# Altium footprint library PcbLib1.PcbLib: 24 footprints (part 1 of 2)
Each footprint in its own frame and in the unit in brackets; x right, y up, seen from the top. Pads: shape width x height; smd on the part's side, far side on the other; paste and mask are expansions set on the pad; w line width, h text height; cw(c..) or ccw(c..) is an arc to the next point about the centre after c.
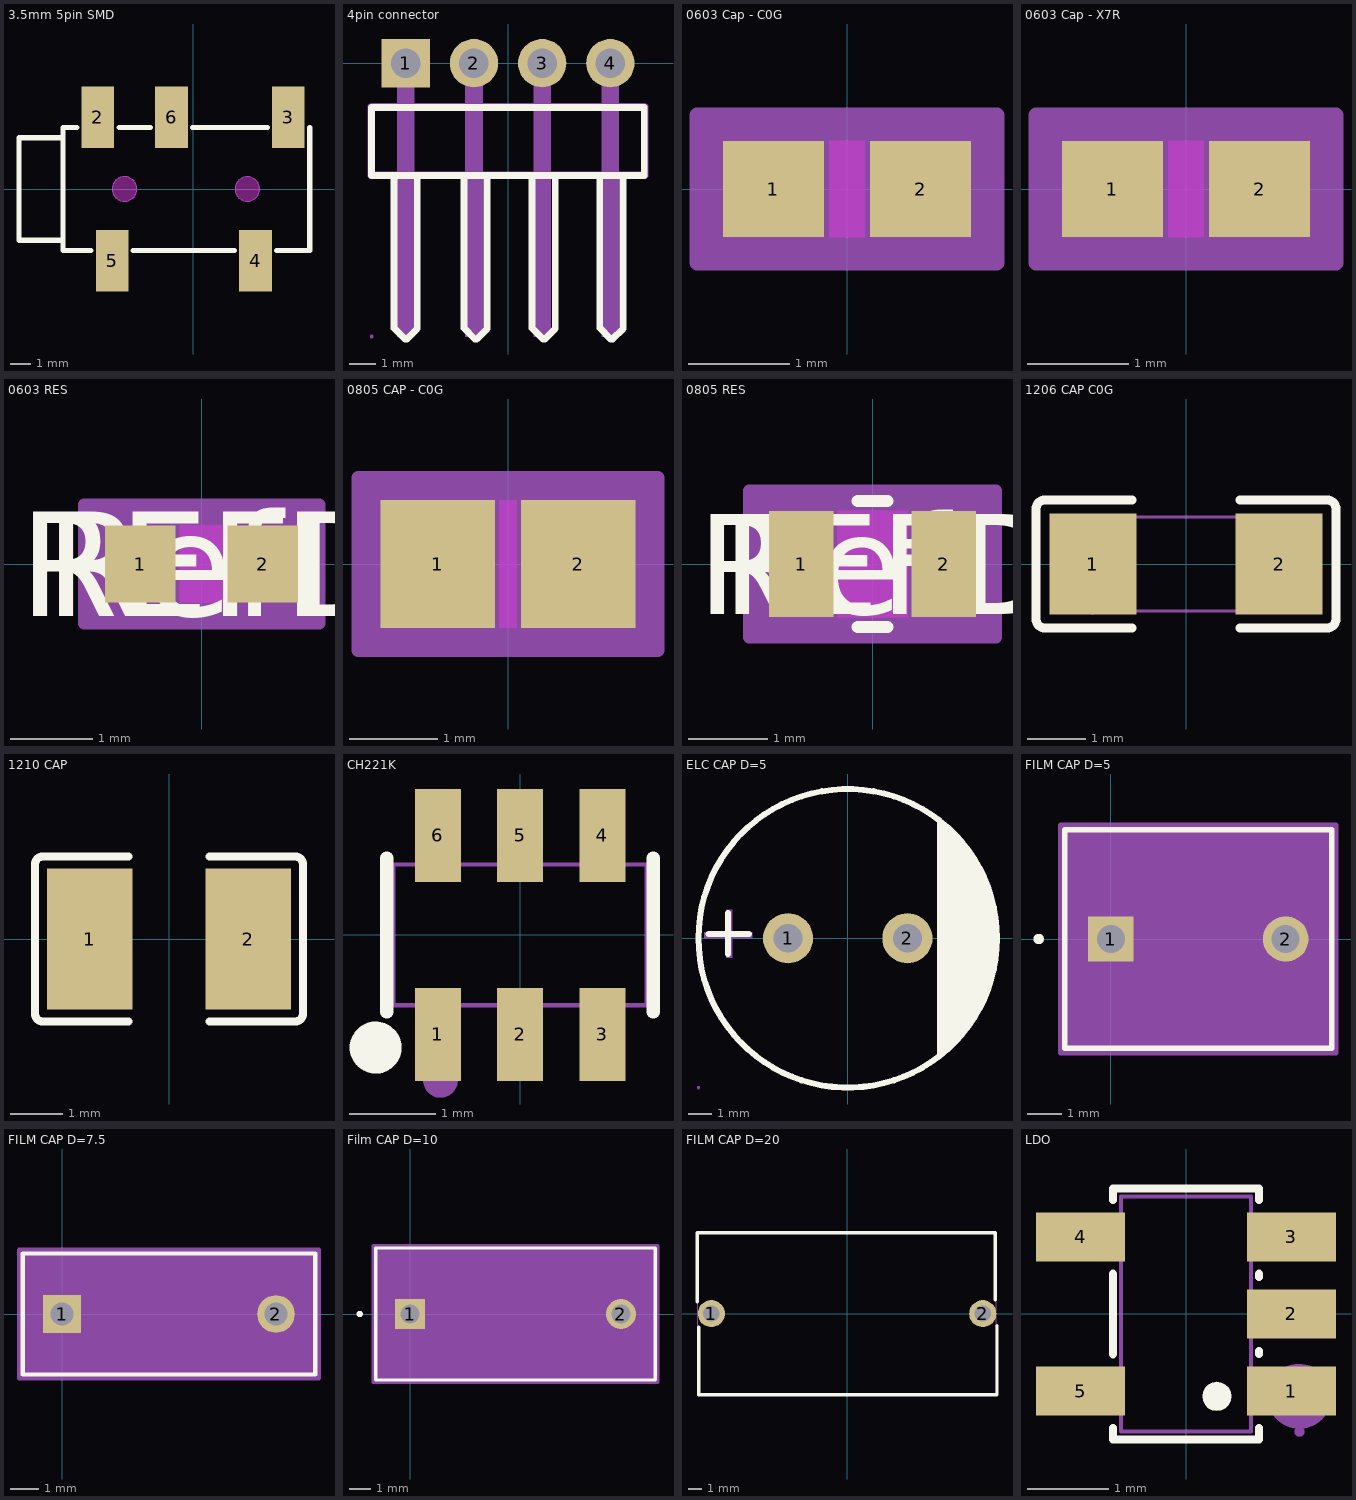
[diagram p0: the footprints below, top view; thin cyan lines are the x and y axes]

## 3.5mm 5pin SMD [mm]
pads (5):
  rect 1.6x3 smd: 2(-4.65,3.5) 3(4.65,3.5) 4(3.05,-3.5) 5(-3.95,-3.5) 6(-1.05,3.5)
Top Overlay:
  lines w0.254: -6.35,-2.5 -8.5,-2.5 -8.5,2.5 -6.35,2.5 ; -5.681,3 -6.35,3 -6.35,-3 -4.981,-3 ; -3.619,3 -2.081,3 ; -2.919,-3 2.019,-3 ; -0.019,3 3.619,3 ; 4.081,-3 5.7,-3 5.7,3 5.681,3
Keep-Out Layer:
  board cut-out: -2.75,0 -2.75,-0.119 -2.841,-0.34 -3.01,-0.509 -3.231,-0.6 -3.469,-0.6 -3.69,-0.509 -3.859,-0.34 -3.95,-0.119 -3.95,0 -3.95,0.119 -3.859,0.34 -3.69,0.509 -3.469,0.6 -3.231,0.6 -3.01,0.509 -2.841,0.34 -2.75,0.119
  board cut-out: 3.25,0 3.25,-0.119 3.159,-0.34 2.99,-0.509 2.769,-0.6 2.531,-0.6 2.31,-0.509 2.141,-0.34 2.05,-0.119 2.05,0 2.05,0.119 2.141,0.34 2.31,0.509 2.531,0.6 2.769,0.6 2.99,0.509 3.159,0.34 3.25,0.119
Keep-Out Layer:
  circle w0.003: c-3.35,0 r0.6
  circle w0.003: c2.65,0 r0.6
  region: -2.75,0 -2.75,-0.119 -2.841,-0.34 -3.01,-0.509 -3.231,-0.6 -3.469,-0.6 -3.69,-0.509 -3.859,-0.34 -3.95,-0.119 -3.95,0 -3.95,0.119 -3.859,0.34 -3.69,0.509 -3.469,0.6 -3.231,0.6 -3.01,0.509 -2.841,0.34 -2.75,0.119
  region: -2.75,0 -2.759,-0.104 -2.786,-0.205 -2.83,-0.3 -2.89,-0.386 -2.964,-0.46 -3.05,-0.52 -3.145,-0.564 -3.246,-0.591 -3.35,-0.6 -3.454,-0.591 -3.555,-0.564 -3.65,-0.52 -3.736,-0.46 -3.81,-0.386 -3.87,-0.3 -3.914,-0.205 -3.941,-0.104 -3.95,0 -3.941,0.104 -3.914,0.205 -3.87,0.3 -3.81,0.386 -3.736,0.46 -3.65,0.52 -3.555,0.564 -3.454,0.591 -3.35,0.6 -3.246,0.591 -3.145,0.564 -3.05,0.52 -2.964,0.46 -2.89,0.386 -2.83,0.3 -2.786,0.205 -2.759,0.104
  region: 3.25,0 3.25,-0.119 3.159,-0.34 2.99,-0.509 2.769,-0.6 2.531,-0.6 2.31,-0.509 2.141,-0.34 2.05,-0.119 2.05,0 2.05,0.119 2.141,0.34 2.31,0.509 2.531,0.6 2.769,0.6 2.99,0.509 3.159,0.34 3.25,0.119
  region: 3.25,0 3.241,-0.104 3.214,-0.205 3.17,-0.3 3.11,-0.386 3.036,-0.46 2.95,-0.52 2.855,-0.564 2.754,-0.591 2.65,-0.6 2.546,-0.591 2.445,-0.564 2.35,-0.52 2.264,-0.46 2.19,-0.386 2.13,-0.3 2.086,-0.205 2.059,-0.104 2.05,0 2.059,0.104 2.086,0.205 2.13,0.3 2.19,0.386 2.264,0.46 2.35,0.52 2.445,0.564 2.546,0.591 2.65,0.6 2.754,0.591 2.855,0.564 2.95,0.52 3.036,0.46 3.11,0.386 3.17,0.3 3.214,0.205 3.241,0.104
Mechanical 1:
  circle w0.003: c-3.35,0 r0.6
  circle w0.003: c2.65,0 r0.6

## 4pin connector [mm]
pads (4):
  rect 1.8x1.8 hole 1.1: 1(-3.81,0)
  round 1.8 hole 1.1: 2(-1.27,0) 3(1.27,0) 4(3.81,0)
Top Overlay:
  lines w0.254: -5.09,-1.699 -5.09,-4.181 5.07,-4.181 5.07,-1.651 -5.09,-1.651 ; -3.84,-10.273 -4.244,-9.869 ; -3.764,-10.273 -3.383,-9.892 ; -1.644,-4.273 -1.644,-9.869 -1.24,-10.273 ; -1.164,-10.273 -0.783,-9.892 -0.783,-4.273 ; 1.299,-10.273 0.895,-9.869 ; 1.375,-10.273 1.756,-9.892 ; 3.417,-4.273 3.417,-9.869 3.821,-10.273 ; 3.897,-10.273 4.278,-9.892 4.278,-4.273 ; -4.244,-9.869 -4.244,-4.273 -4.244,-9.869 ; -3.383,-9.892 -3.383,-4.273 -3.383,-9.892 ; 0.895,-9.869 0.895,-4.273 0.895,-9.869 ; 1.756,-9.892 1.756,-4.273 1.756,-9.892
Mechanical 2:
  region: 4.969,-4.177 4.969,-1.754 -5.104,-1.754 -5.152,-1.744 -5.193,-1.717 -5.221,-1.676 -5.231,-1.627 -5.221,-1.578 -5.193,-1.537 -5.152,-1.51 -5.104,-1.5 5.096,-1.5 5.145,-1.51 5.186,-1.537 5.214,-1.578 5.223,-1.627 5.223,-4.177 5.214,-4.226 5.186,-4.267 5.145,-4.294 5.096,-4.304 5.048,-4.294 5.007,-4.267 4.979,-4.226
  region: -4.973,-1.63 -4.973,-4.053 5.1,-4.053 5.149,-4.063 5.19,-4.09 5.217,-4.131 5.227,-4.18 5.217,-4.229 5.19,-4.27 5.149,-4.297 5.1,-4.307 -5.1,-4.307 -5.149,-4.297 -5.19,-4.27 -5.217,-4.229 -5.227,-4.18 -5.227,-1.63 -5.217,-1.581 -5.19,-1.54 -5.149,-1.513 -5.1,-1.503 -5.051,-1.513 -5.01,-1.54 -4.983,-1.581
Mechanical 6:
  lines w0.051: -5.08,-4.18 -5.08,-1.64 5.08,-1.64 5.08,-4.18 -5.08,-4.18
Mechanical 7:
  region: -4.13,0.32 -4.13,-10.18 -3.49,-10.18 -3.49,0.32
  region: -1.59,0.32 -1.59,-10.18 -0.95,-10.18 -0.95,0.32
  region: 0.95,0.32 0.95,-10.18 1.59,-10.18 1.59,0.32
  region: 3.49,0.32 3.49,-10.18 4.13,-10.18 4.13,0.32
Mechanical 8:
  region: -5.02,-10.18 -5.02,-10.205 -5.055,-10.24 -5.105,-10.24 -5.14,-10.205 -5.14,-10.18 -5.14,-10.155 -5.105,-10.12 -5.055,-10.12 -5.02,-10.155
Mechanical 9:
  region: 3.49,0.32 4.13,0.32 4.13,-0.32 3.49,-0.32
  region: 0.95,0.32 1.59,0.32 1.59,-0.32 0.95,-0.32
  region: -1.59,0.32 -0.95,0.32 -0.95,-0.32 -1.59,-0.32
  region: -4.13,0.32 -3.49,0.32 -3.49,-0.32 -4.13,-0.32

## 0603 Cap - C0G [mm]
pads (2):
  rect 1x0.95 smd paste+0 mask+0: 1(-0.725,0) 2(0.725,0)
Top Layer keep-out:
  region: -0.174,-0.424 -0.174,0.424 0.174,0.424 0.174,-0.424
Top Overlay:
  text ".Designator" at -3.492,-0.635 h1.27
Keep-Out Layer:
  region: -0.174,-0.475 -0.174,0.475 0.174,0.475 0.174,-0.475
Mechanical 13:
  lines w0.025: -0.875,-0.475 -0.875,0.475 ; -0.875,-0.475 -0.375,-0.475 -0.375,0.475 -0.875,0.475 ; -0.875,-0.475 0.875,-0.475 ; -0.875,-0.475 -0.875,0.475 ; -0.875,0.475 0.875,0.475 ; 0.875,-0.475 0.375,-0.475 0.375,0.475 0.875,0.475 ; 0.875,-0.475 0.875,0.475 ; 0.875,-0.475 0.875,0.475
  text ".Designator" at -3.492,-0.635 h1.27
Mechanical 15:
  region: 1.479,-0.729 -1.479,-0.729 -1.479,0.729 1.479,0.729
  lines w0.152: -1.479,-0.729 -1.479,0.729 1.479,0.729 1.479,-0.729 -1.479,-0.729
3D body "CAPC17595_95N_KEM.step": height 0.95, standoff 0, extent -0.875,-0.475 0.875,0.475

## 0603 Cap - X7R [mm]
pads (2):
  rect 1x0.95 smd paste+0 mask+0: 1(-0.725,0) 2(0.725,0)
Top Layer keep-out:
  region: -0.174,-0.424 -0.174,0.424 0.174,0.424 0.174,-0.424
Top Overlay:
  text ".Designator" at -3.492,-0.635 h1.27
Keep-Out Layer:
  region: -0.174,-0.475 -0.174,0.475 0.174,0.475 0.174,-0.475
Mechanical 13:
  lines w0.025: -0.875,-0.475 -0.875,0.475 ; -0.875,-0.475 0.875,-0.475 ; -0.875,-0.475 -0.375,-0.475 -0.375,0.475 -0.875,0.475 ; -0.875,-0.475 -0.875,0.475 ; -0.875,0.475 0.875,0.475 ; 0.875,-0.475 0.875,0.475 ; 0.875,-0.475 0.875,0.475 ; 0.875,-0.475 0.375,-0.475 0.375,0.475 0.875,0.475
  text ".Designator" at -3.492,-0.635 h1.27
Mechanical 15:
  region: 1.479,-0.729 -1.479,-0.729 -1.479,0.729 1.479,0.729
  lines w0.152: -1.479,-0.729 1.479,-0.729 1.479,0.729 -1.479,0.729 -1.479,-0.729
3D body "CAPC17595_95N_KEM.step": height 0.95, standoff 0, extent -0.875,-0.475 0.875,0.475

## 0603 RES [mil]
pads (2):
  rect 33.78x37 smd paste+0 mask+0: 1(-29.39,0) 2(29.39,0)
Top Layer keep-out:
  region: -10.5,-16.5 -10.5,16.5 10.5,16.5 10.5,-16.5
Top Overlay:
  text "RefDes" at -75,-25 h50
  text "REFDES" at -87.5,-25 h50
Keep-Out Layer:
  region: -10.5,-18.5 -10.5,18.5 10.5,18.5 10.5,-18.5
Mechanical 13:
  lines w1: -32.5,-18.5 -32.5,18.5 ; -32.5,-18.5 -12.5,-18.5 -12.5,18.5 -32.5,18.5 ; -32.5,-18.5 32.5,-18.5 ; -32.5,-18.5 -32.5,18.5 ; -32.5,18.5 32.5,18.5 ; 32.5,-18.5 12.5,-18.5 12.5,18.5 32.5,18.5 ; 32.5,-18.5 32.5,18.5 ; 32.5,-18.5 32.5,18.5
  text "RefDes2" at -87.5,-25 h50
Mechanical 15:
  region: 56.28,-28.5 -56.28,-28.5 -56.28,28.5 56.28,28.5
  lines w6: -56.28,-28.5 -56.28,28.5 56.28,28.5 56.28,-28.5 -56.28,-28.5
3D body "RES_CRCW_0603.step": height 20, standoff 0, extent -32.52,-18.5 32.52,18.5

## 0805 CAP - C0G [mm]
pads (2):
  rect 1.3x1.45 smd paste+0 mask+0: 1(-0.8,0) 2(0.8,0)
Top Layer keep-out:
  region: -0.099,-0.674 -0.099,0.674 0.099,0.674 0.099,-0.674
Top Overlay:
  text ".Designator" at -3.492,-0.635 h1.27
Keep-Out Layer:
  region: -0.099,-0.725 -0.099,0.725 0.099,0.725 0.099,-0.725
Mechanical 13:
  lines w0.025: -1.1,-0.725 -1.1,0.725 ; -1.1,-0.725 1.1,-0.725 ; -1.1,-0.725 -0.35,-0.725 -0.35,0.725 -1.1,0.725 ; -1.1,-0.725 -1.1,0.725 ; -1.1,0.725 1.1,0.725 ; 1.1,-0.725 1.1,0.725 ; 1.1,-0.725 1.1,0.725 ; 1.1,-0.725 0.35,-0.725 0.35,0.725 1.1,0.725
  text ".Designator" at -3.492,-0.635 h1.27
Mechanical 15:
  region: 1.704,-0.979 -1.704,-0.979 -1.704,0.979 1.704,0.979
  lines w0.152: -1.704,-0.979 1.704,-0.979 1.704,0.979 -1.704,0.979 -1.704,-0.979
3D body "CAPC220145_88N_KEM.step": height 0.88, standoff 0, extent -1.1,-0.725 1.1,0.725

## 0805 RES [mil]
pads (2):
  rect 32x53 smd paste+0 mask+0: 1(-35.5,0) 2(35.5,0)
Top Layer keep-out:
  region: -17.5,-24.5 -17.5,24.5 17.5,24.5 17.5,-24.5
Top Overlay:
  lines w6: -7.39,-31.5 7.39,-31.5 ; -7.39,31.5 7.39,31.5
  text "RefDes" at -75,-25 h50
  text "REFDES" at -87.5,-25 h50
Keep-Out Layer:
  region: -17.5,-26.5 -17.5,26.5 17.5,26.5 17.5,-26.5
Mechanical 13:
  lines w1: -43.5,-26.5 -43.5,26.5 ; -43.5,-26.5 -19.5,-26.5 -19.5,26.5 -43.5,26.5 ; -43.5,-26.5 43.5,-26.5 ; -43.5,-26.5 -43.5,26.5 ; -43.5,26.5 43.5,26.5 ; 43.5,-26.5 19.5,-26.5 19.5,26.5 43.5,26.5 ; 43.5,-26.5 43.5,26.5 ; 43.5,-26.5 43.5,26.5
  text "RefDes2" at -87.5,-25 h50
Mechanical 15:
  region: 61.5,-36.5 -61.5,-36.5 -61.5,36.5 61.5,36.5
  lines w6: -61.5,-36.5 -61.5,36.5 61.5,36.5 61.5,-36.5 -61.5,-36.5
3D body "STA_RMCF0805_STP.step": height 25.98, standoff 0, extent -43.5,-26.5 43.5,26.5

## 1206 CAP C0G [mm]
pads (2):
  rect 1.485x1.728 smd paste-100 mask+0.051: 1(-1.593,0) 2(1.593,0)
Top Overlay:
  lines w0.152: -0.926,-1.093 -2.411,-1.093 cw(c-2.411,-0.94) -2.564,-0.94 -2.564,0.94 cw(c-2.411,0.94) -2.411,1.093 -0.926,1.093 ; 0.926,-1.093 2.411,-1.093 ccw(c2.411,-0.94) 2.564,-0.94 2.564,0.94 ccw(c2.411,0.94) 2.411,1.093 0.926,1.093
Top Paste:
  region: -0.85,-0.764 -0.85,-0.394 -0.95,-0.294 -1.255,-0.294 -1.355,-0.194 -1.355,0.194 -1.255,0.294 -0.95,0.294 -0.85,0.394 -0.85,0.764 -0.95,0.864 -2.235,0.864 -2.335,0.764 -2.335,-0.764 -2.235,-0.864 -0.95,-0.864
  region: 0.85,-0.764 0.85,-0.394 0.95,-0.294 1.255,-0.294 1.355,-0.194 1.355,0.194 1.255,0.294 0.95,0.294 0.85,0.394 0.85,0.764 0.95,0.864 2.235,0.864 2.335,0.764 2.335,-0.764 2.235,-0.864 0.95,-0.864
Mechanical 6:
  lines w0.051: -1.6,-0.8 1.6,-0.8 1.6,0.8 -1.6,0.8 -1.6,-0.8
Mechanical 8:
  region: -1.54,-0.8 -1.54,-0.825 -1.575,-0.86 -1.625,-0.86 -1.66,-0.825 -1.66,-0.8 -1.66,-0.775 -1.625,-0.74 -1.575,-0.74 -1.54,-0.775
Mechanical 9:
  region: 1.6,-0.8 1.6,0.8 1.1,0.8 1.1,-0.8
  region: -1.6,-0.8 -1.6,0.8 -1.1,0.8 -1.1,-0.8

## 1210 CAP [mm]
pads (2):
  rect 1.635x2.7 smd paste-100 mask+0.051: 1(-1.517,0) 2(1.517,0)
Top Overlay:
  lines w0.152: -0.776,-1.579 -2.411,-1.579 cw(c-2.411,-1.426) -2.564,-1.426 -2.564,1.426 cw(c-2.411,1.426) -2.411,1.579 -0.776,1.579 ; 0.776,-1.579 2.411,-1.579 ccw(c2.411,-1.426) 2.564,-1.426 2.564,1.426 ccw(c2.411,1.426) 2.411,1.579 0.776,1.579
Top Paste:
  region: -0.7,-1.25 -0.7,-0.559 -0.8,-0.459 -1.156,-0.459 -1.256,-0.359 -1.256,0.359 -1.156,0.459 -0.8,0.459 -0.7,0.559 -0.7,1.25 -0.8,1.35 -2.235,1.35 -2.335,1.25 -2.335,-1.25 -2.235,-1.35 -0.8,-1.35
  region: 0.7,-1.25 0.7,-0.559 0.8,-0.459 1.156,-0.459 1.256,-0.359 1.256,0.359 1.156,0.459 0.8,0.459 0.7,0.559 0.7,1.25 0.8,1.35 2.235,1.35 2.335,1.25 2.335,-1.25 2.235,-1.35 0.8,-1.35

## CH221K [mm] "SOT-23-6_L2.9-W1.6-P0.95-LS2.8-BL-2"
pads (6):
  rect 0.532x1.072 smd: 1(-0.95,-1.149) 2(0,-1.149) 3(0.95,-1.149) 4(0.95,1.149) 5(0,1.149) 6(-0.95,1.149)
Top Overlay:
  circle w0.3: c-1.668,-1.301 r0.15
  lines w0.152: -1.539,-0.889 -1.539,0.889 ; 1.539,-0.889 1.539,0.889
Mechanical 2:
  circle w0.2: c-0.92,-1.68 r0.1
Mechanical 6:
  lines w0.051: -1.463,-0.813 1.463,-0.813 1.463,0.813 -1.463,0.813 -1.463,-0.813
Mechanical 7:
  region: -1.187,0.79 -1.187,0.96 -0.712,0.96 -0.712,0.79
  region: -0.237,0.79 -0.237,0.96 0.237,0.96 0.237,0.79
  region: 0.712,0.79 0.712,0.96 1.187,0.96 1.187,0.79
  region: -1.112,-0.935 -1.112,-0.79 -0.787,-0.79 -0.787,-0.935
  region: -0.163,-0.935 -0.163,-0.79 0.163,-0.79 0.163,-0.935
  region: 0.787,-0.935 0.787,-0.79 1.112,-0.79 1.112,-0.935
Mechanical 8:
  region: -1.403,-1.4 -1.403,-1.425 -1.438,-1.46 -1.488,-1.46 -1.523,-1.425 -1.523,-1.4 -1.523,-1.375 -1.488,-1.34 -1.438,-1.34 -1.403,-1.375
Mechanical 9:
  region: -1.187,0.95 -1.187,1.4 -0.712,1.4 -0.712,0.95
  region: -0.237,0.95 -0.237,1.4 0.237,1.4 0.237,0.95
  region: 0.712,0.95 0.712,1.4 1.187,1.4 1.187,0.95
  region: -1.112,-1.4 -1.112,-0.925 -0.787,-0.925 -0.787,-1.4
  region: -0.163,-1.4 -0.163,-0.925 0.163,-0.925 0.163,-1.4
  region: 0.787,-1.4 0.787,-0.925 1.112,-0.925 1.112,-1.4

## ELC CAP D=5 [mm]
pads (2):
  round 2.1 hole 1.2 paste-2539.97 mask+0.05: 1(-2.5,0) 2(2.5,0)
Top Overlay:
  circle w0.254: c0,0 r6.25
  region: 3.75,5 3.75,-5 4.482,-4.268 4.715,-4.022 4.933,-3.763 5.137,-3.493 5.325,-3.211 5.497,-2.919 5.652,-2.619 5.79,-2.31 5.911,-1.993 6.014,-1.671 6.099,-1.343 6.165,-1.011 6.212,-0.676 6.24,-0.338 6.25,0 6.24,0.338 6.212,0.676 6.165,1.011 6.099,1.343 6.014,1.671 5.911,1.993 5.79,2.31 5.652,2.619 5.497,2.919 5.325,3.211 5.137,3.493 4.933,3.763 4.715,4.022 4.482,4.268
  lines w0.254: -5.817,0.178 -4.14,0.178 ; -5.004,-0.66 -5.004,1.067
Mechanical 2:
  region: -5.092,-0.811 -5.092,1.189 -4.842,1.189 -4.842,-0.811
  region: -6,0.25 -4,0.25 -4,0 -6,0
Mechanical 6:
  lines w0.051: -6.25,0 ccw(c0,0) 6.25,0 ccw(c0,0) -6.25,0
Mechanical 8:
  region: -6.19,-6.25 -6.19,-6.275 -6.225,-6.31 -6.275,-6.31 -6.31,-6.275 -6.31,-6.25 -6.31,-6.225 -6.275,-6.19 -6.225,-6.19 -6.19,-6.225
Mechanical 9:
  region: 2.8,0 2.8,-0.06 2.754,-0.17 2.67,-0.254 2.56,-0.3 2.44,-0.3 2.33,-0.254 2.246,-0.17 2.2,-0.06 2.2,0 2.2,0.06 2.246,0.17 2.33,0.254 2.44,0.3 2.56,0.3 2.67,0.254 2.754,0.17 2.8,0.06
  region: -2.2,0 -2.2,-0.06 -2.246,-0.17 -2.33,-0.254 -2.44,-0.3 -2.56,-0.3 -2.67,-0.254 -2.754,-0.17 -2.8,-0.06 -2.8,0 -2.8,0.06 -2.754,0.17 -2.67,0.254 -2.56,0.3 -2.44,0.3 -2.33,0.254 -2.246,0.17 -2.2,0.06

## FILM CAP D=5 [mil]
pads (2):
  rect 52x52 hole 32 paste-99999 mask+0: 1(0,0)
  round 52 hole 32 paste-99999 mask+0: 2(200,0)
Top Overlay:
  circle w6: c-82.5,0 r3
  lines w6: -52.5,-125 252.5,-125 252.5,125 -52.5,125 -52.5,-125
  text ".Designator" at -37.5,-25 h50
Mechanical 13:
  circle w1: c-27.5,0 r3
  lines w1: -47.5,-120 247.5,-120 247.5,120 -47.5,120 -47.5,-120
  text ".Designator" at -37.5,-25 h50
Mechanical 15:
  region: 257.5,-130 -57.5,-130 -57.5,130 257.5,130
  lines w6: -57.5,-130 -57.5,130 257.5,130 257.5,-130 -57.5,-130
3D body "CAP_R82E-7P5X6P1-5P0_KEM.step": height 437.01, standoff -165.98, extent -47.48,-120 247.48,120

## FILM CAP D=7.5 [mil]
pads (2):
  rect 52x52 hole 32 paste-99999 mask+0: 1(0,0)
  round 52 hole 32 paste-99999 mask+0: 2(295.28,0)
Top Overlay:
  lines w6: -54.36,-83.5 -54.36,83.5 349.64,83.5 349.64,-83.5 -54.36,-83.5
  text ".Designator" at 10.14,-25 h50
Mechanical 13:
  lines w1: -49.36,-78.5 -49.36,78.5 344.64,78.5 344.64,-78.5 -49.36,-78.5
  text ".Designator" at 10.14,-25 h50
Mechanical 15:
  region: 354.64,-88.5 -59.36,-88.5 -59.36,88.5 354.64,88.5
  lines w6: -59.36,-88.5 354.64,-88.5 354.64,88.5 -59.36,88.5 -59.36,-88.5
3D body "CAP_B32520_040X085X100_TDK.step": height 335, standoff -165.98, extent -49.37,-78.5 344.65,78.5

## Film CAP D=10 [mil]
pads (2):
  rect 56x56 hole 36 paste-99999 mask+0: 1(0,0)
  round 56 hole 36 paste-99999 mask+0: 2(393.7,0)
Top Overlay:
  circle w6: c-94.15,0 r3
  lines w6: -64.15,-123 457.85,-123 457.85,123 -64.15,123 -64.15,-123
  text ".Designator" at 59.35,-25 h50
Mechanical 13:
  circle w1: c-39.15,0 r3
  lines w1: -59.15,-118 452.85,-118 452.85,118 -59.15,118 -59.15,-118
  text ".Designator" at 59.35,-25 h50
Mechanical 15:
  region: 462.85,-128 -69.15,-128 -69.15,128 462.85,128
  lines w6: -69.15,-128 -69.15,128 462.85,128 462.85,-128 -69.15,-128
3D body "CAP_R46KF310050P0K_KEM.step": height 455.98, standoff -177.99, extent -59.13,-117.99 452.83,117.99

## FILM CAP D=20 [mm]
pads (2):
  round 2 hole 1.2 paste-2539.97 mask+0.05: 1(-10,0) 2(10,0)
Top Overlay:
  lines w0.254: -11.049,0.889 -11.049,5.969 10.922,5.969 10.922,1.016 ; -10.922,-1.016 -10.922,-5.969 11.049,-5.969 11.049,-0.889
Mechanical 6:
  lines w0.051: -11,-6 11,-6 11,6 -11,6 -11,-6
Mechanical 8:
  region: -10.94,-6 -10.94,-6.025 -10.975,-6.06 -11.025,-6.06 -11.06,-6.025 -11.06,-6 -11.06,-5.975 -11.025,-5.94 -10.975,-5.94 -10.94,-5.975
Mechanical 9:
  region: 10.4,0 10.4,-0.08 10.339,-0.227 10.227,-0.339 10.08,-0.4 9.92,-0.4 9.773,-0.339 9.661,-0.227 9.6,-0.08 9.6,0 9.6,0.08 9.661,0.227 9.773,0.339 9.92,0.4 10.08,0.4 10.227,0.339 10.339,0.227 10.4,0.08
  region: -9.6,0 -9.6,-0.08 -9.661,-0.227 -9.773,-0.339 -9.92,-0.4 -10.08,-0.4 -10.227,-0.339 -10.339,-0.227 -10.4,-0.08 -10.4,0 -10.4,0.08 -10.339,0.227 -10.227,0.339 -10.08,0.4 -9.92,0.4 -9.773,0.339 -9.661,0.227 -9.6,0.08

## LDO [mm]
pads (5):
  rect 1.1x0.6 smd: 1(1.3,-0.95) 2(1.3,0) 3(1.3,0.95) 4(-1.3,0.95) 5(-1.3,-0.95)
Top Overlay:
  region: 0.204,-1.016 0.212,-0.961 0.237,-0.911 0.276,-0.871 0.326,-0.846 0.381,-0.837 0.436,-0.846 0.486,-0.871 0.525,-0.911 0.55,-0.961 0.558,-1.016 0.55,-1.071 0.525,-1.121 0.486,-1.161 0.436,-1.186 0.381,-1.195 0.326,-1.186 0.276,-1.161 0.237,-1.121 0.212,-1.071 0.204,-1.016
  lines w0.1: -0.9,-1.404 -0.9,-1.55 0.9,-1.55 0.9,-1.404 ; -0.9,-0.496 -0.9,0.496 ; -0.9,1.404 -0.9,1.55 0.9,1.55 0.9,1.404 ; 0.9,-0.496 0.9,-0.454 ; 0.9,0.454 0.9,0.496
Mechanical 2:
  circle w0.4: c1.397,-1.016 r0.2
Mechanical 6:
  lines w0.051: -0.8,-1.45 -0.8,1.45 0.8,1.45 0.8,-1.45 -0.8,-1.45
Mechanical 7:
  region: -0.96,-1.15 -0.96,-0.75 -0.79,-0.75 -0.79,-1.15
  region: -0.96,0.75 -0.96,1.15 -0.79,1.15 -0.79,0.75
  region: 0.79,0.75 0.79,1.15 0.96,1.15 0.96,0.75
  region: 0.79,-0.2 0.79,0.2 0.96,0.2 0.96,-0.2
  region: 0.79,-1.15 0.79,-0.75 0.96,-0.75 0.96,-1.15
Mechanical 8:
  region: 1.46,-1.45 1.46,-1.475 1.425,-1.51 1.375,-1.51 1.34,-1.475 1.34,-1.45 1.34,-1.425 1.375,-1.39 1.425,-1.39 1.46,-1.425
Mechanical 9:
  region: -1.4,-1.15 -1.4,-0.75 -0.95,-0.75 -0.95,-1.15
  region: -1.4,0.75 -1.4,1.15 -0.95,1.15 -0.95,0.75
  region: 0.95,0.75 0.95,1.15 1.4,1.15 1.4,0.75
  region: 0.95,-0.2 0.95,0.2 1.4,0.2 1.4,-0.2
  region: 0.95,-1.15 0.95,-0.75 1.4,-0.75 1.4,-1.15